# Altium footprint library LimeMicroAltiumLib.PcbLib: 876 footprints (part 31 of 57)
Each footprint in its own frame and in the unit in brackets; x right, y up, seen from the top. Pads: shape width x height; smd on the part's side, far side on the other; paste and mask are expansions set on the pad; w line width, h text height; cw(c..) or ccw(c..) is an arc to the next point about the centre after c.
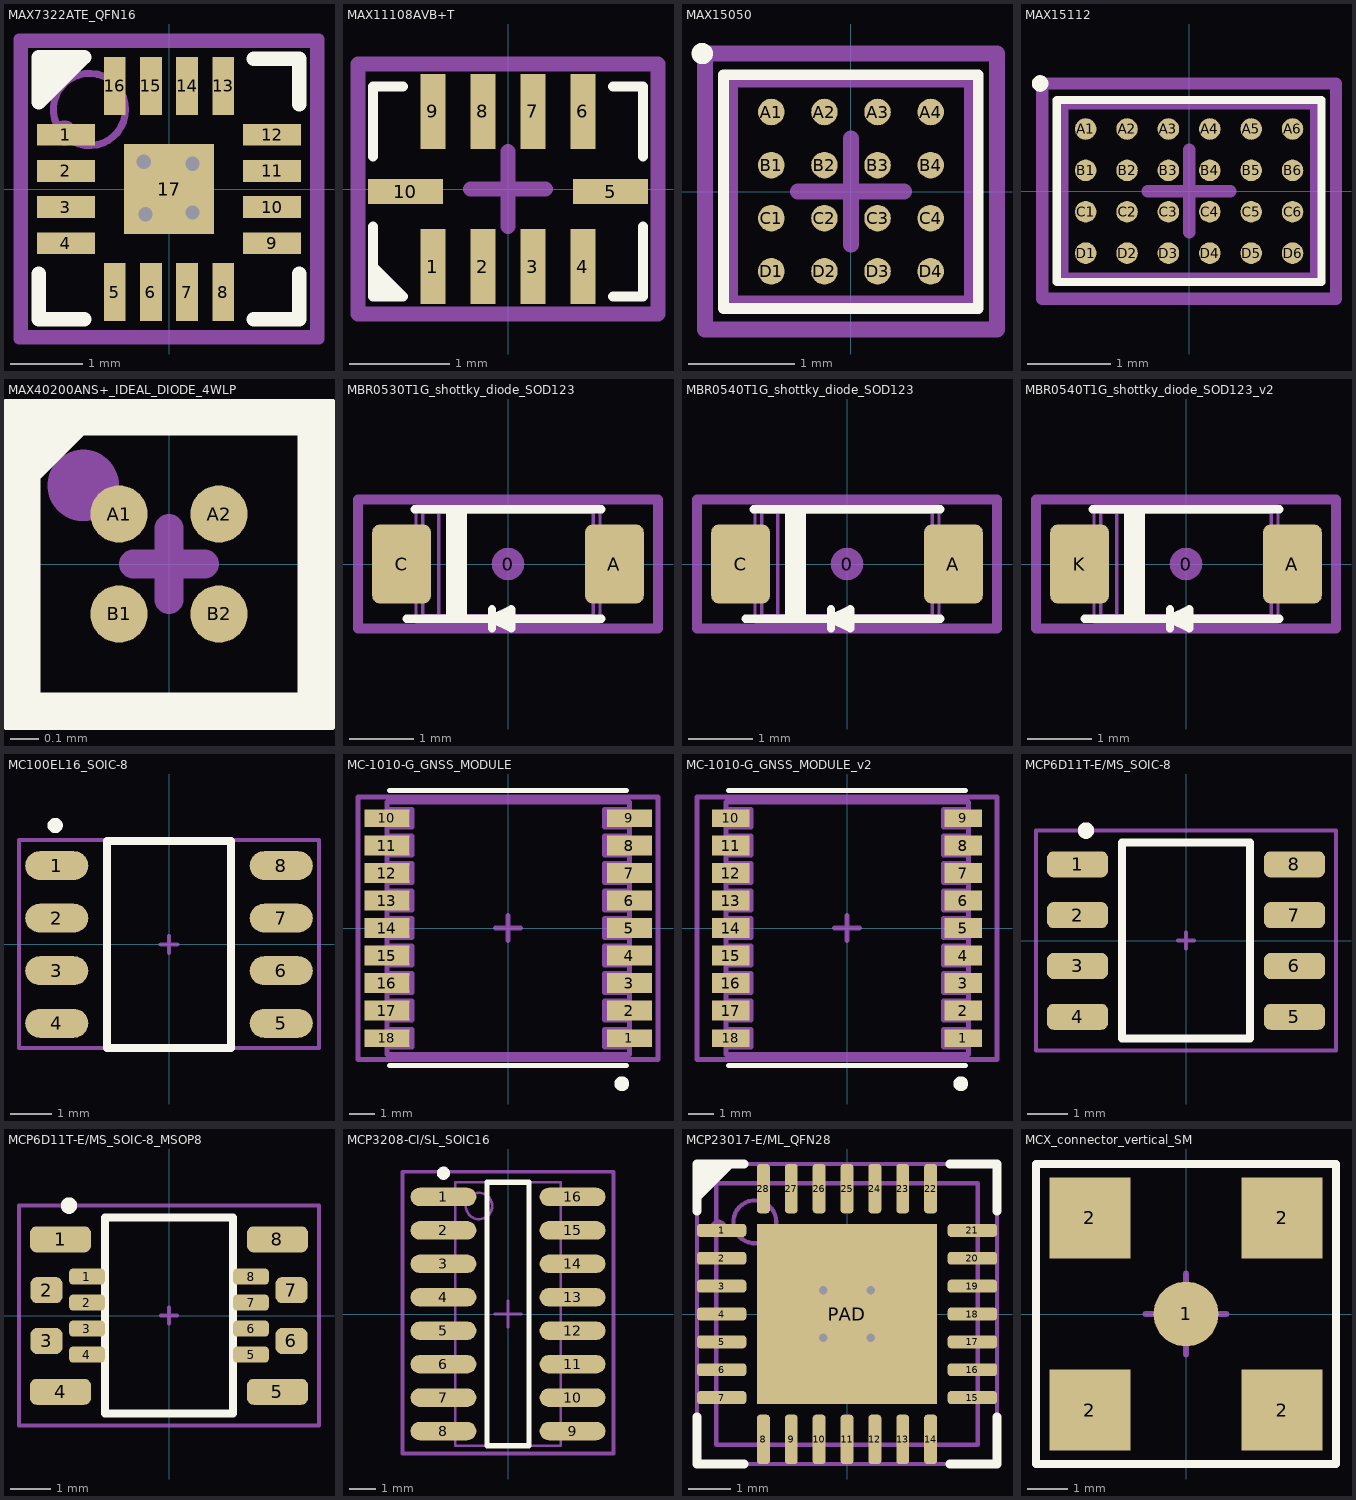
[diagram p30: the footprints below, top view; thin cyan lines are the x and y axes]

## MAX7322ATE_QFN16 [mm]
height 0.8
pads (17):
  rect 0.8x0.3 smd mask+0.05: 1(-1.425,0.75) 2(-1.425,0.25) 3(-1.425,-0.25) 4(-1.425,-0.75) 9(1.425,-0.75) 10(1.425,-0.25) 11(1.425,0.25) 12(1.425,0.75)
  rect 0.3x0.8 smd mask+0.05: 5(-0.75,-1.425) 6(-0.25,-1.425) 7(0.25,-1.425) 8(0.75,-1.425) 13(0.75,1.425) 14(0.25,1.425) 15(-0.25,1.425) 16(-0.75,1.425)
  rect 1.25x1.25 smd mask+0.05: 17(0,0)
via -0.325,-0.35 diameter 0.4 hole 0.2
via 0.325,-0.325 diameter 0.4 hole 0.2
via 0.325,0.35 diameter 0.4 hole 0.2
via -0.35,0.375 diameter 0.4 hole 0.2
Top Overlay:
  region: -1.8,1.2 -1.175,1.825 -1.8,1.825
  lines w0.2: -1.8,-1.175 -1.8,-1.8 -1.175,-1.8 ; 1.175,-1.8 1.8,-1.8 1.8,-1.175 ; 1.175,1.8 1.8,1.8 1.8,1.175 ; -1.8,1.2 -1.8,1.825 -1.175,1.825 -1.8,1.2
Top Solder:
  region: -1.05,0.95 -0.95,1.05 -0.875,0.975 -0.975,0.875
  region: 1.05,0.95 0.95,1.05 0.875,0.975 0.975,0.875
  region: 1.05,-0.95 0.95,-1.05 0.875,-0.975 0.975,-0.875
  region: -1.05,-0.95 -0.95,-1.05 -0.875,-0.975 -0.975,-0.875
Mechanical 13:
  circle w0.1: c-1.1,1.1 r0.5
  lines w0.1: -2,-2 -2,2 2,2 2,-2 -2,-2
Mechanical 15:
  circle w0.35: c-1.45,0.775 r0
  region: -1.8,1.1
  lines w0.15: -0.5,0 0.5,0 ; 0,-0.5 0,0.5 ; -2.075,-2.075 -2.075,2.075 2.075,2.075 2.075,-2.075 -2.075,-2.075
  text ".Designator" at 0,0 h0.55
3D body "User Library-qfn16-3x3.step": height 0.92, standoff 0, extent -1.5,-1.5 1.5,1.5

## MAX11108AVB+T [mm]
pads (10):
  rect 0.25x0.75 smd mask+0.05: 1(-0.75,-0.775) 2(-0.25,-0.775) 3(0.25,-0.775) 4(0.75,-0.775) 6(0.75,0.775) 7(0.25,0.775) 8(-0.25,0.775) 9(-0.75,0.775)
  rect 0.75x0.25 smd mask+0.05: 5(1.025,-0.025) 10(-1.025,-0.025)
Top Overlay:
  region: -1.05,-1.075 -1.35,-0.775 -1.35,-1.075
  lines w0.1: -1.35,-0.375 -1.35,-1.075 -1.05,-1.075 -1.35,-0.775 ; -1.35,0.325 -1.35,1.025 -1.05,1.025 ; 1.05,-1.075 1.35,-1.075 1.35,-0.375 ; 1.05,1.025 1.35,1.025 1.35,0.325 ; -1.35,-0.775 -1.35,-0.775
Mechanical 15:
  circle w0.1: c-0.75,-0.75 r0.035
  lines w0.15: -0.375,0 0,0 ; 0,-0.375 0,0 ; 0,0.375 0,0 ; 0.375,0 0,0 ; -1.5,-1.25 1.4,-1.25 1.5,-1.25 1.5,1.15 1.5,1.25 -1.5,1.25 -1.5,-1.25
  text ".Designator" at 0,0 h0.55
3D body: height 0.5, standoff 0.45, extent -0.874,-0.625 -0.575,-0.325
3D body: height 0.45, standoff 0, extent -1.05,-0.8 1.05,0.8

## MAX15050 [mm] "BGA, 16-Leads, Body 2,22x2,06mmx0,25mm, Pitch 0,50mm"
height 0.25
pads (16):
  round 0.25 smd: A1(-0.75,0.75) A2(-0.25,0.75) A3(0.25,0.75) A4(0.75,0.75) B1(-0.75,0.25) B2(-0.25,0.25) B3(0.25,0.25) B4(0.75,0.25) C1(-0.75,-0.25) C2(-0.25,-0.25) C3(0.25,-0.25) C4(0.75,-0.25) D1(-0.75,-0.75) D2(-0.25,-0.75) D3(0.25,-0.75) D4(0.75,-0.75)
Top Overlay:
  circle w0.1: c-1.4,1.3 r0.05
  lines w0.1: -1.2,-1.1 -1.2,1.1 1.2,1.1 1.2,-1.1 -1.2,-1.1
Mechanical 13:
  lines w0.1: -1.115,-1.03 -1.115,1.03 1.115,1.03 1.115,-1.03 -1.115,-1.03
Mechanical 15:
  lines w0.15: -0.5,0 0.5,0 ; 0,-0.5 0,0.5 ; -1.375,-1.3 -1.375,1.3 1.375,1.3 1.375,-1.3 -1.375,-1.3
  text ".Designator" at 0,0 h0.55
  text "A1" at -1,0.6 h0.3
3D body: height 0.25, standoff 0.25, extent -1.115,-1.03 1.115,1.03

## MAX15112 [mm] "BGA, 24-Leads, Body 3,02x2,07mmx0,25mm, Pitch 0,50mm"
height 0.25
pads (24):
  round 0.26 smd: A1(-1.25,0.75) A2(-0.75,0.75) A3(-0.25,0.75) A4(0.25,0.75) A5(0.75,0.75) A6(1.25,0.75) B1(-1.25,0.25) B2(-0.75,0.25) B3(-0.25,0.25) B4(0.25,0.25) B5(0.75,0.25) B6(1.25,0.25) C1(-1.25,-0.25) C2(-0.75,-0.25) C3(-0.25,-0.25) C4(0.25,-0.25) C5(0.75,-0.25) C6(1.25,-0.25) D1(-1.25,-0.75) D2(-0.75,-0.75) D3(-0.25,-0.75) D4(0.25,-0.75) D5(0.75,-0.75) D6(1.25,-0.75)
Top Overlay:
  circle w0.1: c-1.8,1.3 r0.05
  lines w0.1: -1.6,-1.1 -1.6,1.1 1.6,1.1 1.6,-1.1 -1.6,-1.1
Mechanical 13:
  lines w0.1: -1.51,-1.035 -1.51,1.035 1.51,1.035 1.51,-1.035 -1.51,-1.035
Mechanical 15:
  lines w0.15: -0.5,0 0.5,0 ; 0,-0.5 0,0.5 ; -1.775,-1.3 -1.775,1.3 1.775,1.3 1.775,-1.3 -1.775,-1.3
  text "A1" at -1.4,0.6 h0.3
  text ".Designator" at 0,0 h0.55
3D body: height 0.25, standoff 0.25, extent -1.51,-1.035 1.51,1.035

## MAX40200ANS+_IDEAL_DIODE_4WLP [mm]
pads (4):
  round 0.2 smd paste+0 mask+0.05: A1(-0.175,0.175) A2(0.175,0.175) B1(-0.175,-0.175) B2(0.175,-0.175)
Top Overlay:
  region: -0.525,0.225 -0.525,0.525 -0.225,0.525
  lines w0.15: -0.525,-0.525 -0.525,0.525 0.525,0.525 0.525,-0.525 -0.525,-0.525
Mechanical 15:
  circle w0.2: c-0.3,0.275 r0.025
  lines w0.1: -0.125,0 0,0 ; 0,-0.125 0,0 ; 0,0.125 0,0 ; 0.125,0 0,0 ; -0.525,-0.525 -0.525,0.525 0.525,0.525 0.525,-0.525 -0.525,-0.525
  text ".Designator" at 0,0 h0.55
3D body: height 0.2, standoff -0.05, extent 0.058,0.052 0.3,0.298
3D body: height 0.2, standoff -0.05, extent 0.058,-0.298 0.3,-0.052
3D body: height 0.2, standoff -0.05, extent -0.292,0.052 -0.05,0.298
3D body: height 0.2, standoff -0.05, extent -0.292,-0.298 -0.05,-0.052
3D body: height 0.5, standoff 0.16, extent -0.375,-0.375 0.375,0.375

## MBR0530T1G_shottky_diode_SOD123 [mm]
height 1.15
pads (3):
  round 0.508 on Mech15: 0(0,0)
  rrect25% 0.91x1.22 smd: A(1.65,0) C(-1.65,0)
Top Overlay:
  lines w0.127: -1.575,-0.85 1.448,-0.85 ; -1.45,0.85 1.45,0.85 ; -0.9,-0.85 -0.9,0.85 ; -0.8,-0.85 -0.8,0.85 ; -0.7,-0.85 -0.7,0.85 ; -0.25,-1 -0.25,-0.7 ; 0.05,-0.85 -0.25,-0.85 ; -0.25,-0.85 0.05,-0.7 0.05,-1 -0.25,-0.85
Mechanical 13:
  lines w0.05: -1.766,-0.308 -1.766,0.308 ; -1.707,-0.308 -1.707,0.308 ; -1.517,-0.308 -1.517,0.308 ; -1.425,-0.308 -1.95,-0.308 -1.95,0.308 -1.425,0.308 ; 0.075,-0.9 0.177,-0.798 ; 1.425,-0.308 1.95,-0.308 1.95,0.308 1.425,0.308 ; 1.517,-0.308 1.517,0.308 ; 1.707,-0.308 1.707,0.308 ; 1.766,-0.308 1.766,0.308 ; -1.425,0.9 -1.425,-0.9 1.425,-0.9 ; -1.425,0.9 1.425,0.9 ; -1.425,0.9 -1.323,0.798 ; -1.323,0.798 -1.323,-0.798 -1.072,-0.798 ; -1.323,0.798 -1.072,0.798 ; -1.072,-0.798 -1.072,0.798 ; -1.072,-0.798 1.322,-0.797 ; -1.072,0.798 1.322,0.797 ; 1.322,-0.797 1.425,-0.9 ; 1.322,-0.797 1.322,0.797 ; 1.322,0.797 1.425,0.9 ; 1.425,-0.9 1.425,0.9
Mechanical 15:
  lines w0.15: -2.325,-1 -2.325,1 2.325,1 2.325,-1 -2.325,-1
  text ".Designator" at 0,0 h0.55
  text "C" at -1.9,-0.275 h0.55
  text "A" at 1.475,-0.275 h0.55
3D body "SOD123.STEP": height 1.18, standoff 0, extent -1.95,-0.9 1.95,0.9

## MBR0540T1G_shottky_diode_SOD123 [mm]
height 1.15
pads (3):
  round 0.508 on Mech15: 0(0,0)
  rrect25% 0.91x1.22 smd: A(1.65,0) C(-1.65,0)
Top Overlay:
  lines w0.127: -1.575,-0.85 1.448,-0.85 ; -1.45,0.85 1.45,0.85 ; -0.9,-0.85 -0.9,0.85 ; -0.8,-0.85 -0.8,0.85 ; -0.7,-0.85 -0.7,0.85 ; -0.25,-1 -0.25,-0.7 ; 0.05,-0.85 -0.25,-0.85 ; -0.25,-0.85 0.05,-0.7 0.05,-1 -0.25,-0.85
Mechanical 13:
  lines w0.05: -1.766,-0.308 -1.766,0.308 ; -1.707,-0.308 -1.707,0.308 ; -1.517,-0.308 -1.517,0.308 ; -1.425,-0.308 -1.95,-0.308 -1.95,0.308 -1.425,0.308 ; 0.075,-0.9 0.177,-0.798 ; 1.425,-0.308 1.95,-0.308 1.95,0.308 1.425,0.308 ; 1.517,-0.308 1.517,0.308 ; 1.707,-0.308 1.707,0.308 ; 1.766,-0.308 1.766,0.308 ; -1.425,0.9 -1.425,-0.9 1.425,-0.9 ; -1.425,0.9 1.425,0.9 ; -1.425,0.9 -1.323,0.798 ; -1.323,0.798 -1.323,-0.798 -1.072,-0.798 ; -1.323,0.798 -1.072,0.798 ; -1.072,-0.798 -1.072,0.798 ; -1.072,-0.798 1.322,-0.797 ; -1.072,0.798 1.322,0.797 ; 1.322,-0.797 1.425,-0.9 ; 1.322,-0.797 1.322,0.797 ; 1.322,0.797 1.425,0.9 ; 1.425,-0.9 1.425,0.9
Mechanical 15:
  lines w0.15: -2.325,-1 -2.325,1 2.325,1 2.325,-1 -2.325,-1
  text ".Designator" at 0,0 h0.55
  text "C" at -1.9,-0.275 h0.55
  text "A" at 1.475,-0.275 h0.55
3D body "SOD123.STEP": height 1.18, standoff 0, extent -1.95,-0.9 1.95,0.9

## MBR0540T1G_shottky_diode_SOD123_v2 [mm]
height 1.15
pads (3):
  round 0.508 on Mech15: 0(0,0)
  rrect25% 0.91x1.22 smd: A(1.65,0) K(-1.65,0)
Top Overlay:
  lines w0.127: -1.575,-0.85 1.448,-0.85 ; -1.45,0.85 1.45,0.85 ; -0.9,-0.85 -0.9,0.85 ; -0.8,-0.85 -0.8,0.85 ; -0.7,-0.85 -0.7,0.85 ; -0.25,-1 -0.25,-0.7 ; 0.05,-0.85 -0.25,-0.85 ; -0.25,-0.85 0.05,-1 0.05,-0.7 -0.25,-0.85
Mechanical 13:
  lines w0.05: -1.766,-0.308 -1.766,0.308 ; -1.707,-0.308 -1.707,0.308 ; -1.517,-0.308 -1.517,0.308 ; -1.425,-0.308 -1.95,-0.308 -1.95,0.308 -1.425,0.308 ; 0.075,-0.9 0.177,-0.798 ; 1.425,-0.308 1.95,-0.308 1.95,0.308 1.425,0.308 ; 1.517,-0.308 1.517,0.308 ; 1.707,-0.308 1.707,0.308 ; 1.766,-0.308 1.766,0.308 ; -1.425,0.9 -1.323,0.798 ; -1.425,0.9 1.425,0.9 ; -1.425,0.9 -1.425,-0.9 1.425,-0.9 ; -1.323,0.798 -1.072,0.798 ; -1.323,0.798 -1.323,-0.798 -1.072,-0.798 ; -1.072,-0.798 1.322,-0.797 ; -1.072,-0.798 -1.072,0.798 ; -1.072,0.798 1.322,0.797 ; 1.322,-0.797 1.322,0.797 ; 1.322,-0.797 1.425,-0.9 ; 1.322,0.797 1.425,0.9 ; 1.425,-0.9 1.425,0.9
Mechanical 15:
  lines w0.15: -2.325,-1 2.325,-1 2.325,1 -2.325,1 -2.325,-1
  text "A" at 1.475,-0.275 h0.55
  text "C" at -1.9,-0.275 h0.55
  text ".Designator" at 0,0 h0.55
3D body "SOD123.STEP": height 1.18, standoff 0, extent -1.95,-0.9 1.95,0.9

## MC100EL16_SOIC-8 [mm]
pads (8):
  oval 1.525x0.7 smd mask+0.05: 1(-2.712,1.905) 2(-2.712,0.635) 3(-2.712,-0.635) 4(-2.712,-1.905) 5(2.712,-1.905) 6(2.712,-0.635) 7(2.712,0.635) 8(2.712,1.905)
Top Overlay:
  circle w0.254: c-2.75,2.875 r0.056
  lines w0.2: -1.5,-2.5 1.5,-2.5 1.5,2.5 -1.5,2.5 -1.5,-2.5
Mechanical 15:
  circle w0.254: c-2.675,1.9 r0.071
  lines w0.1: -0.2,0 0,0 ; 0,-0.2 0,0 ; 0,0.2 0,0 ; 0.2,0 0,0 ; -3.625,-2.5 3.625,-2.5 3.625,2.525 -3.625,2.525 -3.625,-2.5
  text ".Designator" at 0,0 h0.55
3D body "MC100EL16DG.stp": height 1.75, standoff 0, extent -3,-2.45 3,2.45

## MC-1010-G_GNSS_MODULE [mm]
pads (18):
  rect 1.8x0.7 smd mask+0.05: 1(4.85,-4.4) 9(4.85,4.4) 10(-4.85,4.4) 18(-4.85,-4.4)
  rect 1.8x0.8 smd mask+0.05: 2(4.85,-3.3) 3(4.85,-2.2) 4(4.85,-1.1) 5(4.85,0) 6(4.85,1.1) 7(4.85,2.2) 8(4.85,3.3) 11(-4.85,3.3) 12(-4.85,2.2) 13(-4.85,1.1) 14(-4.85,0) 15(-4.85,-1.1) 16(-4.85,-2.2) 17(-4.85,-3.3)
Top Overlay:
  circle w0.3: c4.55,-6.225 r0.146
  lines w0.2: -4.75,-5.5 4.75,-5.5 ; -4.75,5.5 4.75,5.5
Mechanical 13:
  lines w0.2: -4.534,-4.434 cw(c-4.85,-4.434) -4.85,-4.75 -3.85,-4.75 -3.85,-4.05 -4.85,-4.05 cw(c-4.85,-4.366) -4.534,-4.366 ; -4.534,4.366 cw(c-4.85,4.366) -4.85,4.05 -3.85,4.05 -3.85,4.75 -4.85,4.75 cw(c-4.85,4.434) -4.534,4.434 ; 4.534,-4.434 ccw(c4.85,-4.434) 4.85,-4.75 3.85,-4.75 3.85,-4.05 4.85,-4.05 ccw(c4.85,-4.366) 4.534,-4.366 ; 4.534,4.366 ccw(c4.85,4.366) 4.85,4.05 3.85,4.05 3.85,4.75 4.85,4.75 ccw(c4.85,4.434) 4.534,4.434 ; -4.85,-5.05 4.85,-5.05 4.85,5.05 -4.85,5.05 -4.85,-5.05 ; -4.85,-3.675 ccw(c-4.85,-3.359) -4.534,-3.359 -4.534,-3.241 ccw(c-4.85,-3.241) -4.85,-2.925 -3.85,-2.925 -3.85,-3.675 -4.85,-3.675 ; -4.85,-2.575 ccw(c-4.85,-2.259) -4.534,-2.259 -4.534,-2.141 ccw(c-4.85,-2.141) -4.85,-1.825 -3.85,-1.825 -3.85,-2.575 -4.85,-2.575 ; -4.85,-1.475 ccw(c-4.85,-1.159) -4.534,-1.159 -4.534,-1.041 ccw(c-4.85,-1.041) -4.85,-0.725 -3.85,-0.725 -3.85,-1.475 -4.85,-1.475 ; -4.85,-0.375 ccw(c-4.85,-0.059) -4.534,-0.059 -4.534,0.059 ccw(c-4.85,0.059) -4.85,0.375 -3.85,0.375 -3.85,-0.375 -4.85,-0.375 ; -4.85,0.725 ccw(c-4.85,1.041) -4.534,1.041 -4.534,1.159 ccw(c-4.85,1.159) -4.85,1.475 -3.85,1.475 -3.85,0.725 -4.85,0.725 ; -4.85,1.825 ccw(c-4.85,2.141) -4.534,2.141 -4.534,2.259 ccw(c-4.85,2.259) -4.85,2.575 -3.85,2.575 -3.85,1.825 -4.85,1.825 ; -4.85,2.925 ccw(c-4.85,3.241) -4.534,3.241 -4.534,3.359 ccw(c-4.85,3.359) -4.85,3.675 -3.85,3.675 -3.85,2.925 -4.85,2.925 ; 3.85,-3.675 3.85,-2.925 4.85,-2.925 ccw(c4.85,-3.241) 4.534,-3.241 4.534,-3.359 ccw(c4.85,-3.359) 4.85,-3.675 3.85,-3.675 ; 3.85,-2.575 4.85,-2.575 cw(c4.85,-2.259) 4.534,-2.259 4.534,-2.141 cw(c4.85,-2.141) 4.85,-1.825 3.85,-1.825 3.85,-2.575 ; 3.85,-1.475 4.85,-1.475 cw(c4.85,-1.159) 4.534,-1.159 4.534,-1.041 cw(c4.85,-1.041) 4.85,-0.725 3.85,-0.725 3.85,-1.475 ; 3.85,-0.375 4.85,-0.375 cw(c4.85,-0.059) 4.534,-0.059 4.534,0.059 cw(c4.85,0.059) 4.85,0.375 3.85,0.375 3.85,-0.375 ; 3.85,0.725 3.85,1.475 4.85,1.475 ccw(c4.85,1.159) 4.534,1.159 4.534,1.041 ccw(c4.85,1.041) 4.85,0.725 3.85,0.725 ; 3.85,1.825 3.85,2.575 4.85,2.575 ccw(c4.85,2.259) 4.534,2.259 4.534,2.141 ccw(c4.85,2.141) 4.85,1.825 3.85,1.825 ; 3.85,2.925 4.85,2.925 cw(c4.85,3.241) 4.534,3.241 4.534,3.359 cw(c4.85,3.359) 4.85,3.675 3.85,3.675 3.85,2.925
Mechanical 15:
  lines w0.2: -0.5,0 0.5,0 ; 0,-0.5 0,0.5 ; -6,-5.25 -6,5.25 6,5.25 6,-5.25 -6,-5.25
  text ".Designator" at 0,0 h0.55
  text "1" at 4.75,-4.75 h0.55
  text "9" at 4.75,4.25 h0.55
  text "10" at -5.25,4.25 h0.55
  text "18" at -5.25,-4.75 h0.55
3D body: height 2, standoff 0, extent -4.85,-5.05 4.85,5.05

## MC-1010-G_GNSS_MODULE_v2 [mm]
pads (18):
  rect 1.5x0.7 smd mask+0.05: 1(4.65,-4.4) 9(4.65,4.4) 10(-4.65,4.4) 18(-4.65,-4.4)
  rect 1.5x0.8 smd mask+0.05: 2(4.65,-3.3) 3(4.65,-2.2) 4(4.65,-1.1) 5(4.65,0) 6(4.65,1.1) 7(4.65,2.2) 8(4.65,3.3) 11(-4.65,3.3) 12(-4.65,2.2) 13(-4.65,1.1) 14(-4.65,0) 15(-4.65,-1.1) 16(-4.65,-2.2) 17(-4.65,-3.3)
Top Overlay:
  circle w0.3: c4.55,-6.225 r0.146
  lines w0.2: -4.75,-5.5 4.75,-5.5 ; -4.75,5.5 4.75,5.5
Mechanical 13:
  lines w0.2: -4.534,-4.434 cw(c-4.85,-4.434) -4.85,-4.75 -3.85,-4.75 -3.85,-4.05 -4.85,-4.05 cw(c-4.85,-4.366) -4.534,-4.366 ; -4.534,4.366 cw(c-4.85,4.366) -4.85,4.05 -3.85,4.05 -3.85,4.75 -4.85,4.75 cw(c-4.85,4.434) -4.534,4.434 ; 4.534,-4.434 ccw(c4.85,-4.434) 4.85,-4.75 3.85,-4.75 3.85,-4.05 4.85,-4.05 ccw(c4.85,-4.366) 4.534,-4.366 ; 4.534,4.366 ccw(c4.85,4.366) 4.85,4.05 3.85,4.05 3.85,4.75 4.85,4.75 ccw(c4.85,4.434) 4.534,4.434 ; -4.85,-5.05 4.85,-5.05 4.85,5.05 -4.85,5.05 -4.85,-5.05 ; -4.85,-3.675 ccw(c-4.85,-3.359) -4.534,-3.359 -4.534,-3.241 ccw(c-4.85,-3.241) -4.85,-2.925 -3.85,-2.925 -3.85,-3.675 -4.85,-3.675 ; -4.85,-2.575 ccw(c-4.85,-2.259) -4.534,-2.259 -4.534,-2.141 ccw(c-4.85,-2.141) -4.85,-1.825 -3.85,-1.825 -3.85,-2.575 -4.85,-2.575 ; -4.85,-1.475 ccw(c-4.85,-1.159) -4.534,-1.159 -4.534,-1.041 ccw(c-4.85,-1.041) -4.85,-0.725 -3.85,-0.725 -3.85,-1.475 -4.85,-1.475 ; -4.85,-0.375 ccw(c-4.85,-0.059) -4.534,-0.059 -4.534,0.059 ccw(c-4.85,0.059) -4.85,0.375 -3.85,0.375 -3.85,-0.375 -4.85,-0.375 ; -4.85,0.725 ccw(c-4.85,1.041) -4.534,1.041 -4.534,1.159 ccw(c-4.85,1.159) -4.85,1.475 -3.85,1.475 -3.85,0.725 -4.85,0.725 ; -4.85,1.825 ccw(c-4.85,2.141) -4.534,2.141 -4.534,2.259 ccw(c-4.85,2.259) -4.85,2.575 -3.85,2.575 -3.85,1.825 -4.85,1.825 ; -4.85,2.925 ccw(c-4.85,3.241) -4.534,3.241 -4.534,3.359 ccw(c-4.85,3.359) -4.85,3.675 -3.85,3.675 -3.85,2.925 -4.85,2.925 ; 3.85,-3.675 3.85,-2.925 4.85,-2.925 ccw(c4.85,-3.241) 4.534,-3.241 4.534,-3.359 ccw(c4.85,-3.359) 4.85,-3.675 3.85,-3.675 ; 3.85,-2.575 4.85,-2.575 cw(c4.85,-2.259) 4.534,-2.259 4.534,-2.141 cw(c4.85,-2.141) 4.85,-1.825 3.85,-1.825 3.85,-2.575 ; 3.85,-1.475 4.85,-1.475 cw(c4.85,-1.159) 4.534,-1.159 4.534,-1.041 cw(c4.85,-1.041) 4.85,-0.725 3.85,-0.725 3.85,-1.475 ; 3.85,-0.375 4.85,-0.375 cw(c4.85,-0.059) 4.534,-0.059 4.534,0.059 cw(c4.85,0.059) 4.85,0.375 3.85,0.375 3.85,-0.375 ; 3.85,0.725 3.85,1.475 4.85,1.475 ccw(c4.85,1.159) 4.534,1.159 4.534,1.041 ccw(c4.85,1.041) 4.85,0.725 3.85,0.725 ; 3.85,1.825 3.85,2.575 4.85,2.575 ccw(c4.85,2.259) 4.534,2.259 4.534,2.141 ccw(c4.85,2.141) 4.85,1.825 3.85,1.825 ; 3.85,2.925 4.85,2.925 cw(c4.85,3.241) 4.534,3.241 4.534,3.359 cw(c4.85,3.359) 4.85,3.675 3.85,3.675 3.85,2.925
Mechanical 15:
  lines w0.2: -0.5,0 0.5,0 ; 0,-0.5 0,0.5 ; -6,-5.25 -6,5.25 6,5.25 6,-5.25 -6,-5.25
  text ".Designator" at 0,0 h0.55
  text "1" at 4.75,-4.75 h0.55
  text "9" at 4.75,4.25 h0.55
  text "10" at -5.25,4.25 h0.55
  text "18" at -5.25,-4.75 h0.55
3D body: height 2, standoff 0, extent -4.85,-5.05 4.85,5.05

## MCP6D11T-E/MS_SOIC-8 [mm]
pads (8):
  rrect50% 1.525x0.65 smd: 1(-2.712,1.905) 2(-2.712,0.635) 3(-2.712,-0.635) 4(-2.712,-1.905) 5(2.712,-1.905) 6(2.712,-0.635) 7(2.712,0.635) 8(2.712,1.905)
Top Overlay:
  circle w0.254: c-2.5,2.75 r0.079
  lines w0.2: -1.6,-2.45 1.6,-2.45 1.6,2.45 -1.6,2.45 -1.6,-2.45
Mechanical 15:
  circle w0.254: c-2.675,1.925 r0.079
  lines w0.1: -0.2,0 0,0 ; 0,-0.2 0,0 ; 0,0.2 0,0 ; 0.2,0 0,0 ; -3.75,-2.75 3.75,-2.75 3.75,2.75 -3.75,2.75 -3.75,-2.75
  text ".Designator" at 0,0 h0.55
3D body "AD8131ARZ.stp": height 1.75, standoff 0, extent -3,-2.45 3,2.45

## MCP6D11T-E/MS_SOIC-8_MSOP8 [mm]
pads (16):
  rrect50% 1.525x0.65 smd mask+0.025: 1(-2.712,1.905) 4(-2.712,-1.905) 5(2.712,-1.905) 8(2.712,1.905)
  rrect50% 0.9x0.4 smd mask+0.025: 1(-2.051,0.975) 2(-2.051,0.325) 3(-2.051,-0.325) 4(-2.051,-0.975) 5(2.051,-0.975) 6(2.051,-0.325) 7(2.051,0.325) 8(2.051,0.975)
  rrect50% 0.8x0.65 smd mask+0.025: 2(-3.062,0.635) 3(-3.062,-0.635) 6(3.062,-0.635) 7(3.062,0.635)
Top Overlay:
  circle w0.254: c-2.5,2.75 r0.079
  lines w0.2: -1.6,-2.45 -1.6,2.45 1.6,2.45 1.6,-2.45 -1.6,-2.45
Mechanical 15:
  circle w0.254: c-2.675,1.925 r0.079
  lines w0.1: -0.2,0 0,0 ; 0,-0.2 0,0 ; 0,0.2 0,0 ; 0.2,0 0,0 ; -3.75,-2.75 -3.75,2.75 3.75,2.75 3.75,-2.75 -3.75,-2.75
  text ".Designator" at 0,0 h0.55
3D body "SOP_MCP6D11T-EMS_MCH.step": height 1.09, standoff 0, extent -2.451,-1.499 2.451,1.499
3D body "AD8131ARZ.stp": height 1.75, standoff 0, extent -3,-2.45 3,2.45

## MCP3208-CI/SL_SOIC16 [mm] "SOIC, 16-Leads, Body 9.9x3.9mm, Pitch 1.27mm, IPC Low Density"
height 1.75
pads (16):
  oval 2.5x0.7 smd: 1(-2.45,4.445) 2(-2.45,3.175) 3(-2.45,1.905) 4(-2.45,0.635) 5(-2.45,-0.635) 6(-2.45,-1.905) 7(-2.45,-3.175) 8(-2.45,-4.445) 9(2.45,-4.445) 10(2.45,-3.175) 11(2.45,-1.905) 12(2.45,-0.635) 13(2.45,0.635) 14(2.45,1.905) 15(2.45,3.175) 16(2.45,4.445)
Top Overlay:
  circle w0.25: c-2.45,5.345 r0.125
  lines w0.2: -0.8,-5 0.8,-5 0.8,5 -0.8,5 -0.8,-5
Mechanical 13:
  circle w0.1: c-1.1,4.1 r0.5
  lines w0.1: -2,-5 2,-5 2,5 -2,5 -2,-5
Mechanical 15:
  circle w0.2: c-2.5,4.5 r0.09
  lines w0.1: -0.5,0 0.5,0 ; 0,-0.5 0,0.5
  lines w0.15: -4,-5.3 4,-5.3 4,5.4 -4,5.4 -4,-5.3
  text ".Designator" at 0,0 h0.55
3D body "User Library-SOIC-16-1.step": height 1.4, standoff 0, extent -3,-4.95 3,4.95

## MCP23017-E/ML_QFN28 [mm]
pads (29):
  rrect50% 1.15x0.3 smd mask+0.05: 1(-2.925,1.95) 2(-2.925,1.3) 3(-2.925,0.65) 4(-2.925,0) 5(-2.925,-0.65) 6(-2.925,-1.3) 7(-2.925,-1.95) 15(2.925,-1.95) 16(2.925,-1.3) 17(2.925,-0.65) 18(2.925,0) 19(2.925,0.65) 20(2.925,1.3) 21(2.925,1.95)
  rrect50% 0.3x1.15 smd mask+0.05: 8(-1.95,-2.925) 9(-1.3,-2.925) 10(-0.65,-2.925) 11(0,-2.925) 12(0.65,-2.925) 13(1.3,-2.925) 14(1.95,-2.925) 22(1.95,2.925) 23(1.3,2.925) 24(0.65,2.925) 25(0,2.925) 26(-0.65,2.925) 27(-1.3,2.925) 28(-1.95,2.925)
  rect 4.2x4.2 smd mask+0.05: PAD(0,0)
via 0.55,-0.55 diameter 0.4 hole 0.2
via -0.55,-0.55 diameter 0.4 hole 0.2
via 0.55,0.55 diameter 0.4 hole 0.2
via -0.55,0.55 diameter 0.4 hole 0.2
Top Overlay:
  region: -3.5,2.6 -2.6,3.5 -3.5,3.5
  lines w0.2: -3.5,-2.4 -3.5,-3.5 -2.4,-3.5 ; -3.5,2.4 -3.5,3.5 -2.4,3.5 ; 2.4,-3.5 3.5,-3.5 3.5,-2.4 ; 2.4,3.5 3.5,3.5 3.5,2.4
Mechanical 13:
  circle w0.1: c-2.15,2.15 r0.5
  lines w0.1: -3.05,-3.05 3.05,-3.05 3.05,3.05 -3.05,3.05 -3.05,-3.05
Mechanical 15:
  circle w0.2: c-3,2 r0.1
  lines w0.1: -0.5,0 0.5,0 ; 0,-0.5 0,0.5 ; -3.5,-3.5 3.5,-3.5 3.5,3.5 -3.5,3.5 -3.5,-3.5
  text ".Designator" at 0,0 h0.55
3D body: height 1, standoff 0, extent -3.05,-3.05 3.05,3.05
3D body: height 1.01, standoff 0, extent -2.399,1.9 -1.901,2.4

## MCX_connector_vertical_SM [mm]
pads (5):
  round 1.6 smd: 1(0,0)
  rect 2x2 smd: 2(-2.37,-2.37) 2(-2.37,2.37) 2(2.37,-2.37) 2(2.37,2.37)
Top Overlay:
  lines w0.2: -3.7,-3.7 3.7,-3.7 3.7,3.7 -3.7,3.7 -3.7,-3.7
Mechanical 15:
  lines w0.15: -1,0 0,0 ; 0,-1 0,0 ; 0,1 0,0 ; 1,0 0,0 ; -3.7,-3.7 -3.7,3.7 3.7,3.7 3.7,-3.7 -3.7,-3.7
  text ".Designator" at 0,0 h0.55
3D body "User Library-MCX_SMD_v1.step": height 5.9, standoff 0, extent -2.95,-2.95 2.95,2.95